# Altium footprint library PCB_Libraries.PcbLib: 49 footprints (part 2 of 4)
Each footprint in its own frame and in the unit in brackets; x right, y up, seen from the top. Pads: shape width x height; smd on the part's side, far side on the other; paste and mask are expansions set on the pad; w line width, h text height; cw(c..) or ccw(c..) is an arc to the next point about the centre after c.
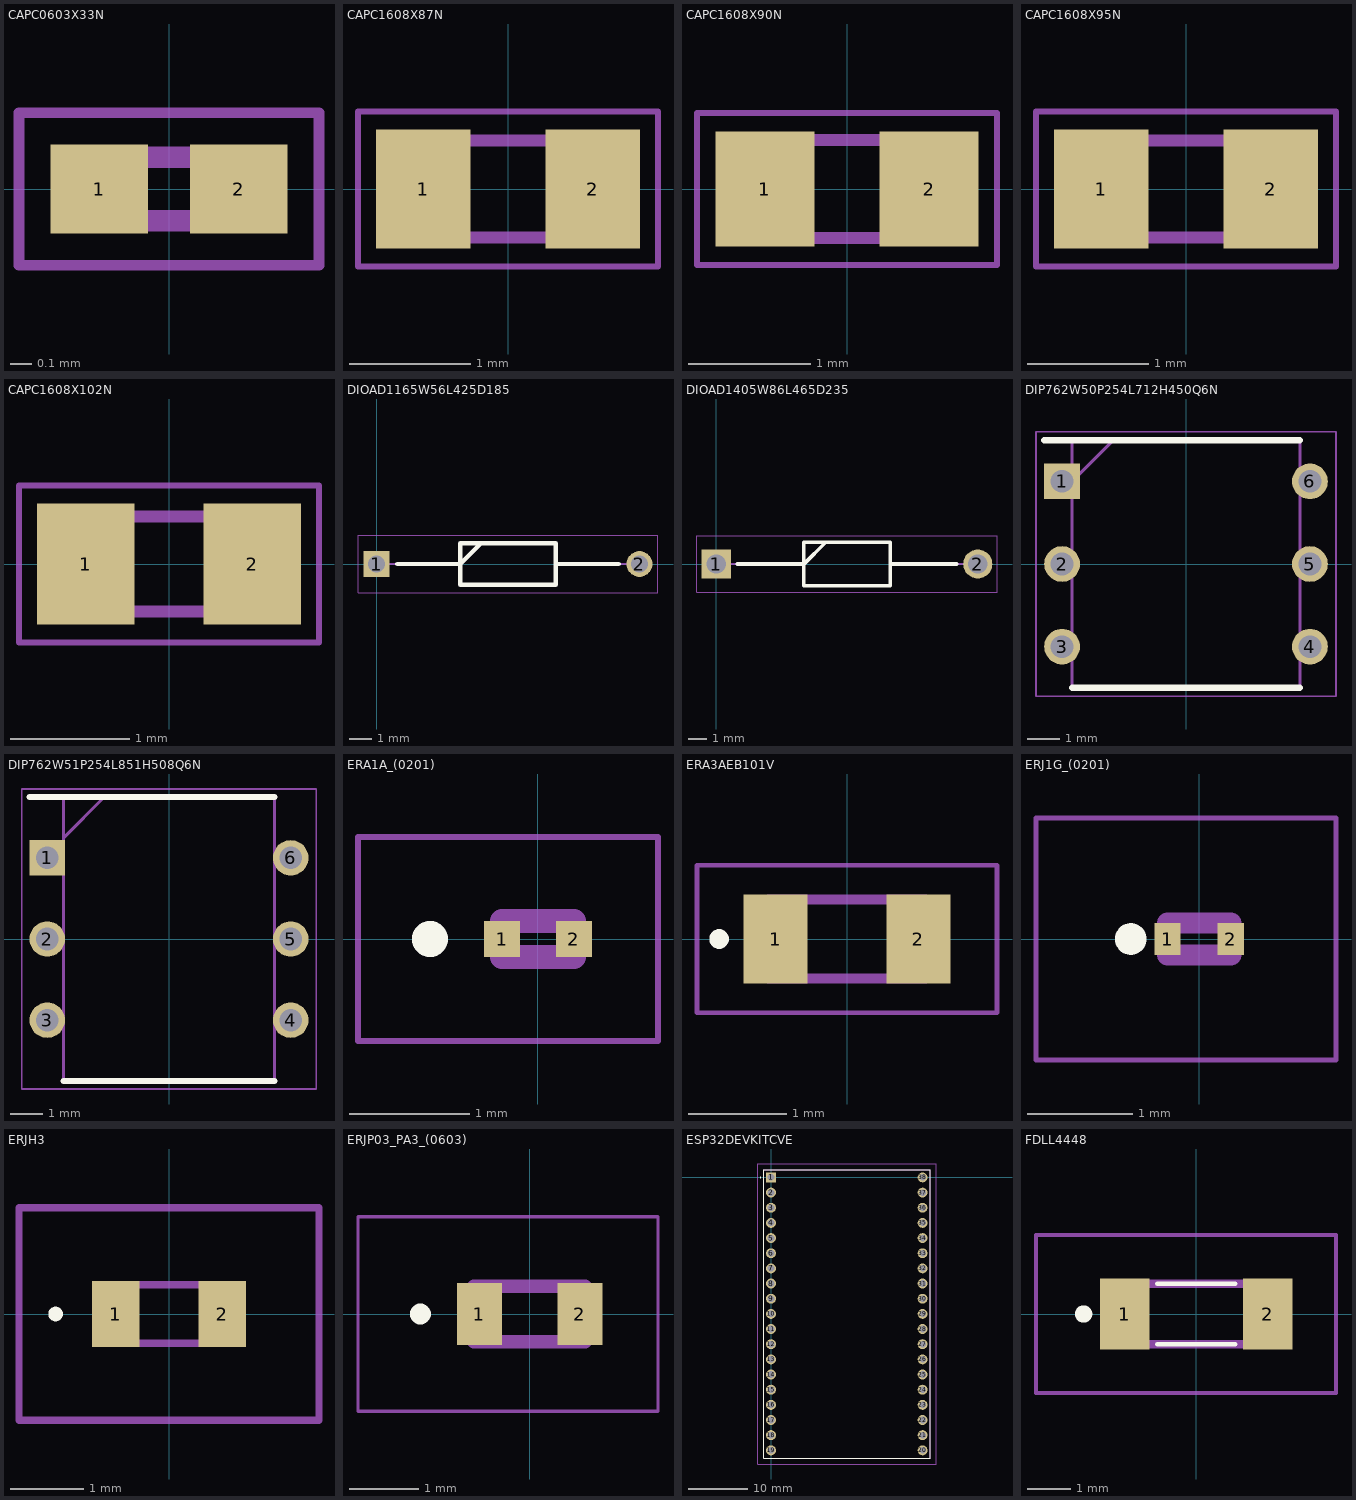
[diagram p1: the footprints below, top view; thin cyan lines are the x and y axes]

## CAPC0603X33N [mm]
pads (2):
  rect 0.46x0.42 smd: 1(-0.33,0) 2(0.33,0)
Mechanical 13:
  lines w0.1: -0.3,-0.15 -0.3,0.15 0.3,0.15 0.3,-0.15 -0.3,-0.15
Mechanical 15:
  lines w0.05: -0.71,-0.36 -0.71,0.36 0.71,0.36 0.71,-0.36 -0.71,-0.36
3D body "GRM033R71H102KA12D.stp": height 0.33, standoff 0, extent -0.3,-0.15 0.3,0.15

## CAPC1608X87N [mm]
pads (2):
  rect 0.78x0.98 smd: 1(-0.7,0) 2(0.7,0)
Mechanical 13:
  lines w0.1: -0.8,-0.4 -0.8,0.4 0.8,0.4 0.8,-0.4 -0.8,-0.4
Mechanical 15:
  lines w0.05: -1.24,-0.64 -1.24,0.64 1.24,0.64 1.24,-0.64 -1.24,-0.64
3D body "C0603C103K5RAC7013.stp": height 0.87, standoff 0, extent -0.87,-0.48 0.88,0.47

## CAPC1608X90N [mm]
pads (2):
  rect 0.81x0.94 smd: 1(-0.67,0) 2(0.67,0)
Mechanical 13:
  lines w0.1: -0.8,-0.4 -0.8,0.4 0.8,0.4 0.8,-0.4 -0.8,-0.4
Mechanical 15:
  lines w0.05: -1.225,-0.62 -1.225,0.62 1.225,0.62 1.225,-0.62 -1.225,-0.62
3D body "MSASE168SB7105KTNA01.stp": height 0.9, standoff 0, extent -0.8,-0.4 0.8,0.4

## CAPC1608X95N [mm]
pads (2):
  rect 0.78x0.98 smd: 1(-0.7,0) 2(0.7,0)
Mechanical 13:
  lines w0.1: -0.8,-0.4 -0.8,0.4 0.8,0.4 0.8,-0.4 -0.8,-0.4
Mechanical 15:
  lines w0.05: -1.24,-0.64 -1.24,0.64 1.24,0.64 1.24,-0.64 -1.24,-0.64
3D body "C0603C104K5RAC3121.stp": height 0.87, standoff 0, extent -0.87,-0.48 0.88,0.47

## CAPC1608X102N [mm]
pads (2):
  rect 0.82x1.02 smd: 1(-0.7,0) 2(0.7,0)
Mechanical 13:
  lines w0.1: -0.8,-0.4 -0.8,0.4 0.8,0.4 0.8,-0.4 -0.8,-0.4
Mechanical 15:
  lines w0.05: -1.26,-0.66 -1.26,0.66 1.26,0.66 1.26,-0.66 -1.26,-0.66
3D body "0603YD106KAT2A.stp": height 1.02, standoff 0, extent -0.8,-0.4 0.8,0.4

## DIOAD1165W56L425D185 [mm]
pads (2):
  rect 1.15x1.15 hole 0.75: 1(0,0)
  round 1.15 hole 0.75: 2(11.7,0)
Top Overlay:
  lines w0.2: 0.925,0 3.725,0 4.65,0.925 ; 7.975,0 10.775,0 ; 3.725,-0.925 3.725,0.925 7.975,0.925 7.975,-0.925 3.725,-0.925
Mechanical 13:
  lines w0.1: 0,0 3.725,0 4.65,0.925 ; 7.975,0 11.7,0 ; 3.725,-0.925 3.725,0.925 7.975,0.925 7.975,-0.925 3.725,-0.925
Mechanical 15:
  lines w0.05: -0.825,-1.275 -0.825,1.275 12.525,1.275 12.525,-1.275 -0.825,-1.275
3D body "1N4148,133.stp": height 32.04, standoff -28.96, extent 0.958,1.687 2.668,3.388

## DIOAD1405W86L465D235 [mm]
pads (2):
  rect 1.575x1.575 hole 1.05: 1(0,0)
  round 1.575 hole 1.05: 2(14.1,0)
Top Overlay:
  lines w0.2: 1.138,0 4.725,0 5.9,1.175 ; 9.375,0 12.962,0 ; 4.725,-1.175 4.725,1.175 9.375,1.175 9.375,-1.175 4.725,-1.175
Mechanical 13:
  lines w0.1: 0,0 4.725,0 5.9,1.175 ; 9.375,0 14.1,0 ; 4.725,-1.175 4.725,1.175 9.375,1.175 9.375,-1.175 4.725,-1.175
Mechanical 15:
  lines w0.05: -1.038,-1.525 -1.038,1.525 15.137,1.525 15.137,-1.525 -1.038,-1.525
3D body "1N4004G.stp": height 2.7, standoff -2.7, extent -0.43,-1.34 14.48,1.34

## DIP762W50P254L712H450Q6N [mm]
pads (6):
  rect 1.1x1.1 hole 0.7: 1(-3.81,2.54)
  round 1.1 hole 0.7: 2(-3.81,0) 3(-3.81,-2.54) 4(3.81,-2.54) 5(3.81,0) 6(3.81,2.54)
Top Overlay:
  lines w0.2: -4.36,3.81 3.5,3.81 ; -3.5,-3.81 3.5,-3.81
Mechanical 13:
  lines w0.1: -3.5,2.54 -2.23,3.81 ; -3.5,-3.81 -3.5,3.81 3.5,3.81 3.5,-3.81 -3.5,-3.81
Mechanical 15:
  lines w0.05: -4.61,-4.06 -4.61,4.06 4.61,4.06 4.61,-4.06 -4.61,-4.06
3D body "4N35.stp": height 4.5, standoff -3.5, extent -3.935,-3.56 3.935,3.56

## DIP762W51P254L851H508Q6N [mm]
pads (6):
  rect 1.11x1.11 hole 0.71: 1(-3.81,2.54)
  round 1.11 hole 0.71: 2(-3.81,0) 3(-3.81,-2.54) 4(3.81,-2.54) 5(3.81,0) 6(3.81,2.54)
Top Overlay:
  lines w0.2: -4.365,4.445 3.3,4.445 ; -3.3,-4.445 3.3,-4.445
Mechanical 13:
  lines w0.1: -3.3,3.175 -2.03,4.445 ; -3.3,-4.445 -3.3,4.445 3.3,4.445 3.3,-4.445 -3.3,-4.445
Mechanical 15:
  lines w0.05: -4.615,-4.695 -4.615,4.695 4.615,4.695 4.615,-4.695 -4.615,-4.695
3D body "MOC3073M.stp": height 5.08, standoff -3.5, extent -3.938,-4.255 3.938,4.255

## ERA1A_(0201) [mm]
pads (2):
  rect 0.3x0.3 smd: 1(-0.3,0) 2(0.3,0)
Top Overlay:
  circle w0.2: c-0.9,0 r0.05
Mechanical 13:
  lines w0.2: -0.3,-0.15 -0.3,0.15 0.3,0.15 0.3,-0.15 -0.3,-0.15
Mechanical 15:
  lines w0.05: -1.5,-0.85 -1.5,0.85 1,0.85 1,-0.85 -1.5,-0.85
3D body "ERA-1AEB472C.stp": height 0.23, standoff 0, extent -0.3,-0.15 0.3,0.15

## ERA3AEB101V [mm]
pads (2):
  rect 0.65x0.9 smd: 1(-0.725,0) 2(0.725,0)
Top Overlay:
  lines w0.1: -1.3,-0.05 ccw(c-1.3,0) -1.3,0.05 ccw(c-1.3,0) -1.3,-0.05
Mechanical 13:
  lines w0.1: -0.8,-0.4 -0.8,0.4 0.8,0.4 0.8,-0.4 -0.8,-0.4
Mechanical 15:
  lines w0.05: -1.525,-0.75 -1.525,0.75 1.525,0.75 1.525,-0.75 -1.525,-0.75
3D body "ERA-3AEB201V.stp": height 0.45, standoff 0, extent -0.8,-0.4 0.8,0.4

## ERJ1G_(0201) [mm]
pads (2):
  rect 0.25x0.3 smd: 1(-0.3,0) 2(0.3,0)
Top Overlay:
  circle w0.2: c-0.65,0 r0.05
Mechanical 13:
  lines w0.2: -0.3,-0.15 -0.3,0.15 0.3,0.15 0.3,-0.15 -0.3,-0.15
Mechanical 15:
  lines w0.05: -1.55,-1.15 -1.55,1.15 1.3,1.15 1.3,-1.15 -1.55,-1.15
3D body "ERJ-1GNJ121C.stp": height 0.23, standoff 0, extent -0.3,-0.15 0.3,0.15

## ERJH3 [mm]
pads (2):
  rect 0.65x0.9 smd: 1(-0.725,0) 2(0.725,0)
Top Overlay:
  lines w0.1: -1.6,0 ccw(c-1.55,0) -1.5,0 ccw(c-1.55,0) -1.6,0
Mechanical 13:
  lines w0.1: -0.8,-0.4 -0.8,0.4 0.8,0.4 0.8,-0.4 -0.8,-0.4
Mechanical 15:
  lines w0.1: -2.05,-1.45 -2.05,1.45 2.05,1.45 2.05,-1.45 -2.05,-1.45
3D body "ERJ-H3EF7502V.stp": height 0.55, standoff 0, extent -0.8,-0.4 0.8,0.4

## ERJP03_PA3_(0603) [mm]
pads (2):
  rect 0.65x0.9 smd: 1(-0.725,0) 2(0.725,0)
Top Overlay:
  circle w0.2: c-1.575,0 r0.05
Mechanical 13:
  lines w0.2: -0.8,-0.4 0.8,-0.4 0.8,0.4 -0.8,0.4 -0.8,-0.4
Mechanical 15:
  lines w0.05: -2.475,-1.4 1.85,-1.4 1.85,1.4 -2.475,1.4 -2.475,-1.4
3D body "ERJ-PA3F4121V.stp": height 0.45, standoff 0, extent -0.8,-0.4 0.8,0.4

## ESP32DEVKITCVE [mm]
pads (38):
  rect 1.665x1.665 hole 1.11: 1(0,0)
  round 1.665 hole 1.11: 2(0,-2.54) 3(0,-5.08) 4(0,-7.62) 5(0,-10.16) 6(0,-12.7) 7(0,-15.24) 8(0,-17.78) 9(0,-20.32) 10(0,-22.86) 11(0,-25.4) 12(0,-27.94) 13(0,-30.48) 14(0,-33.02) 15(0,-35.56) 16(0,-38.1) 17(0,-40.64) 18(0,-43.18) 19(0,-45.72) 20(25.4,-45.72) 21(25.4,-43.18) 22(25.4,-40.64) 23(25.4,-38.1) 24(25.4,-35.56) 25(25.4,-33.02) 26(25.4,-30.48) 27(25.4,-27.94) 28(25.4,-25.4) 29(25.4,-22.86) 30(25.4,-20.32) 31(25.4,-17.78) 32(25.4,-15.24) 33(25.4,-12.7) 34(25.4,-10.16) 35(25.4,-7.62) 36(25.4,-5.08) 37(25.4,-2.54) 38(25.4,0)
Top Overlay:
  lines w0.1: -1.8,0 cw(c-1.75,0) -1.7,0 cw(c-1.75,0) -1.8,0
  lines w0.2: -1.24,-47.01 -1.24,1.25 26.7,1.25 26.7,-47.01 -1.24,-47.01
Mechanical 13:
  lines w0.1: -1.24,-47.01 -1.24,1.25 26.7,1.25 26.7,-47.01 -1.24,-47.01
Mechanical 15:
  lines w0.1: -2.24,-48.01 -2.24,2.25 27.7,2.25 27.7,-48.01 -2.24,-48.01
3D body "ESP32-DEVKITC-VE.stp": height 5.1, standoff -5, extent -1.24,-47.01 26.7,1.25

## FDLL4448 [mm]
pads (2):
  rect 1.15x1.65 smd: 1(-1.65,0) 2(1.65,0)
Top Overlay:
  lines w0.1: -0.9,-0.7 0.9,-0.7 ; -0.9,0.7 0.9,0.7
  lines w0.2: -2.6,-0.1 cw(c-2.6,0) -2.6,0.1 cw(c-2.6,0) -2.6,-0.1
Mechanical 13:
  lines w0.2: -1.7,-0.7 -1.7,0.7 1.7,0.7 1.7,-0.7 -1.7,-0.7
Mechanical 15:
  lines w0.1: -3.7,-1.825 -3.7,1.825 3.225,1.825 3.225,-1.825 -3.7,-1.825
3D body "FDLL4148.stp": height 1.5, standoff 0, extent -1.88,-0.745 1.72,0.745